# Altium schematic symbol library LUCID_LIGHT_Custom_Mosfet.SchLib: 1 symbol
Pins are listed as number, name and electrical type; pins without a type are passive.

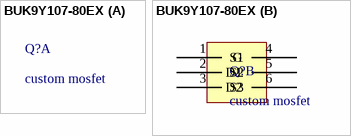
[diagram p0: symbol BUK9Y107-80EX]

## BUK9Y107-80EX
designator Q?, comment custom mosfet
80 V N-channel MOSFET; Supplier 1: Arrow Electronics; Supplier Part Number 1: BUK9Y107-80EX
footprint LFPAK56_SOT669_BUK9Y107
part B pins: 1 S1, 2 S2, 3 S3, 4 G, 5 D1, 6 D2